# Altium footprint library INDPM4848X280N.PcbLib: 1 footprints
Each footprint in its own frame and in the unit in brackets; x right, y up, seen from the top. Pads: shape width x height; smd on the part's side, far side on the other; paste and mask are expansions set on the pad; w line width, h text height; cw(c..) or ccw(c..) is an arc to the next point about the centre after c.
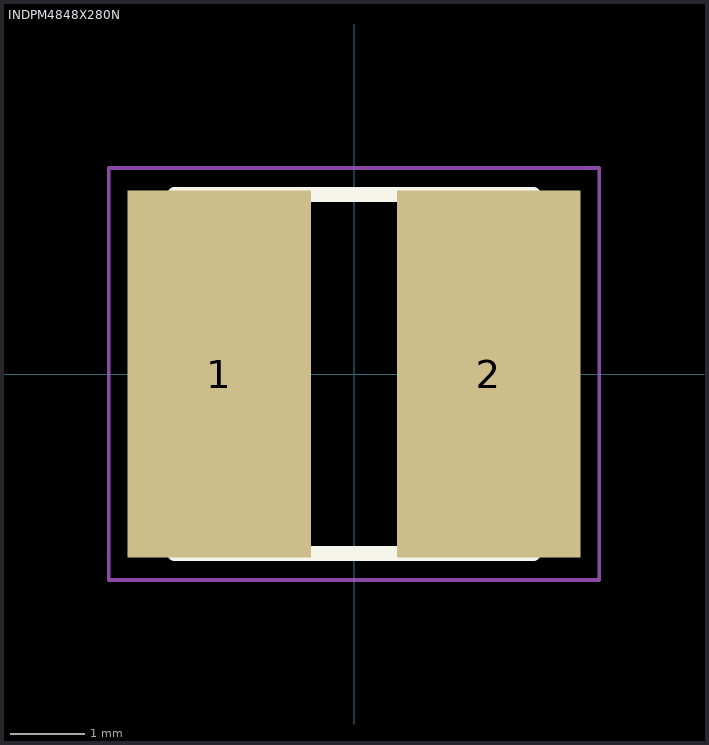
[diagram p0: the footprint, top view; thin cyan lines are the x and y axes]

## INDPM4848X280N [mm]
pads (2):
  rect 2.45x4.9 smd: 1(-1.8,0) 2(1.8,0)
Top Overlay:
  lines w0.2: -2.4,-2.4 2.4,-2.4 ; -2.4,2.4 2.4,2.4
Mechanical 15:
  lines w0.1: -2.4,-2.4 2.4,-2.4 2.4,2.4 -2.4,2.4 -2.4,-2.4
Mechanical 20:
  lines w0.05: -3.275,-2.75 3.275,-2.75 3.275,2.75 -3.275,2.75 -3.275,-2.75